# Altium footprint library Data_Converters.PcbLib: 4 footprints
Each footprint in its own frame and in the unit in brackets; x right, y up, seen from the top. Pads: shape width x height; smd on the part's side, far side on the other; paste and mask are expansions set on the pad; w line width, h text height; cw(c..) or ccw(c..) is an arc to the next point about the centre after c.
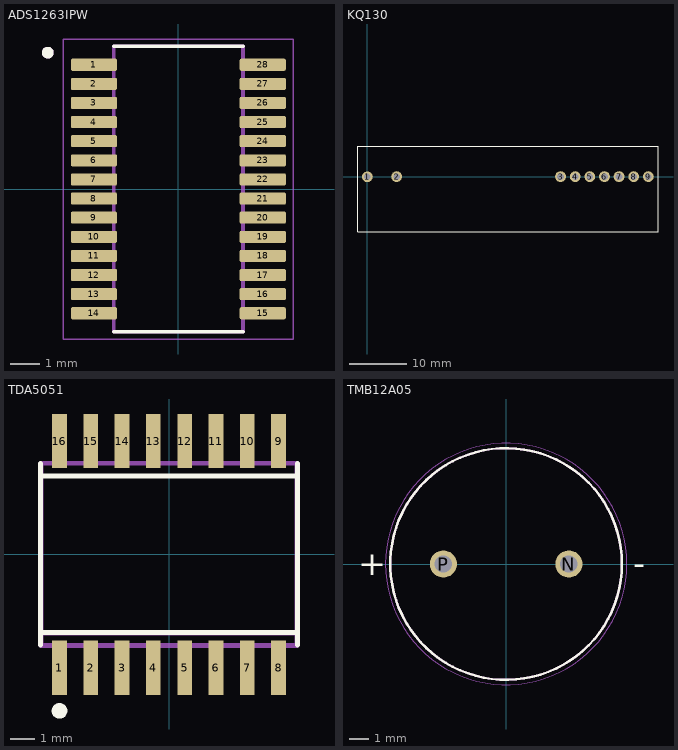
[diagram p0: the footprints below, top view; thin cyan lines are the x and y axes]

## ADS1263IPW [mm] "SOP65P640X120-28N"
pads (28):
  rrect25% 1.57x0.41 smd: 1(-2.87,4.225) 2(-2.87,3.575) 3(-2.87,2.925) 4(-2.87,2.275) 5(-2.87,1.625) 6(-2.87,0.975) 7(-2.87,0.325) 8(-2.87,-0.325) 9(-2.87,-0.975) 10(-2.87,-1.625) 11(-2.87,-2.275) 12(-2.87,-2.925) 13(-2.87,-3.575) 14(-2.87,-4.225) 15(2.87,-4.225) 16(2.87,-3.575) 17(2.87,-2.925) 18(2.87,-2.275) 19(2.87,-1.625) 20(2.87,-0.975) 21(2.87,-0.325) 22(2.87,0.325) 23(2.87,0.975) 24(2.87,1.625) 25(2.87,2.275) 26(2.87,2.925) 27(2.87,3.575) 28(2.87,4.225)
Top Overlay:
  circle w0.2: c-4.44,4.635 r0.1
  lines w0.127: -2.2,-4.85 2.2,-4.85 ; -2.2,4.85 2.2,4.85
Mechanical 13:
  circle w0.2: c-4.44,4.635 r0.1
  lines w0.127: -2.2,-4.85 2.2,-4.85 2.2,4.85 -2.2,4.85 -2.2,-4.85
Mechanical 15:
  lines w0.05: -3.905,-5.1 3.905,-5.1 3.905,5.1 -3.905,5.1 -3.905,-5.1
3D body "ADS1263IPW.STEP": height 1.2, standoff 0, extent -3.2,-4.85 3.2,4.85

## KQ130 [mil] "MODULE POWER LINE COMMUNICATIONS"
pads (9):
  round 74 hole 46: 1(0,-1) 2(200,0) 3(1320,0) 4(1420,0) 5(1520,0) 6(1620,0) 7(1720,0) 8(1820,0) 9(1920,0)
Top Overlay:
  lines w7.87: -64,-377 -64,208 1986,208 1986,-377 -64,-377
3D body "KQ130.step": height 1500, standoff -243.78, extent -71,-383.42 2009,215

## TDA5051 [mm] "SO16W"
pads (16):
  rect 0.6x2.2 smd: 1(-4.445,-4.6) 2(-3.175,-4.6) 3(-1.905,-4.6) 4(-0.635,-4.6) 5(0.635,-4.6) 6(1.905,-4.6) 7(3.175,-4.6) 8(4.445,-4.6) 9(4.445,4.6) 10(3.175,4.6) 11(1.905,4.6) 12(0.635,4.6) 13(-0.635,4.6) 14(-1.905,4.6) 15(-3.175,4.6) 16(-4.445,4.6)
Top Overlay:
  circle w0.381: c-4.445,-6.35 r0.127
  lines w0.203: -5.207,-3.683 -5.207,3.683 ; -5.207,-3.175 5.207,-3.175 ; -5.207,3.175 5.207,3.175 ; 5.207,-3.683 5.207,3.683
Mechanical 13:
  region: -4.2,3.802 -4.692,3.802 -4.692,5.32 -4.2,5.32
  region: -2.93,3.804 -3.423,3.804 -3.423,5.32 -2.93,5.32
  region: -1.66,3.802 -2.151,3.802 -2.151,5.32 -1.66,5.32
  region: -0.39,3.801 -0.88,3.801 -0.88,5.32 -0.39,5.32
  region: 0.88,3.804 0.39,3.804 0.39,5.32 0.88,5.32
  region: 2.15,3.803 1.661,3.803 1.661,5.32 2.15,5.32
  region: 3.42,3.801 2.931,3.801 2.931,5.32 3.42,5.32
  region: 4.69,3.801 4.201,3.801 4.201,5.32 4.69,5.32
  region: 4.69,-5.323 4.202,-5.323 4.202,-3.8 4.69,-3.8
  region: 3.42,-5.329 2.935,-5.329 2.935,-3.8 3.42,-3.8
  region: 2.15,-5.327 1.662,-5.327 1.662,-3.8 2.15,-3.8
  region: 0.88,-5.323 0.39,-5.323 0.39,-3.8 0.88,-3.8
  region: -0.39,-5.329 -0.882,-5.329 -0.882,-3.8 -0.39,-3.8
  region: -1.66,-5.323 -2.151,-5.323 -2.151,-3.8 -1.66,-3.8
  region: -2.93,-5.328 -3.425,-5.328 -3.425,-3.8 -2.93,-3.8
  region: -4.2,-5.325 -4.694,-5.325 -4.694,-3.8 -4.2,-3.8
  lines w0.2: -5.19,-3.2 5.19,-3.2 ; -5.19,-3.2 -5.19,3.7 5.19,3.7 5.19,-3.2 ; -5.19,-3.2 -5.19,-3.7 5.19,-3.7 5.19,-3.2
3D body "step_temp.STEP": height 2.65, standoff 0, extent -5.15,-5.162 5.15,5.162

## TMB12A05 [mm] "TMB12A05-1508"
pads (2):
  round 1.408 hole 0.9: N(3.25,0) P(-3.25,0)
Top Overlay:
  circle w0.127: c0,0 r6
  text "-" at 6.593,-0.571 h1.27
  text "+" at -7.67,-0.572 h1.28
Mechanical 13:
  circle w0.127: c0,0 r6
Mechanical 15:
  circle w0.05: c0,0 r6.25
3D body "step_temp.STEP": height 9.5, standoff -5.5, extent -6,-6 6,6